# Altium footprint library PcbLib1.PcbLib: 335 footprints (part 11 of 22)
Each footprint in its own frame and in the unit in brackets; x right, y up, seen from the top. Pads: shape width x height; smd on the part's side, far side on the other; paste and mask are expansions set on the pad; w line width, h text height; cw(c..) or ccw(c..) is an arc to the next point about the centre after c.
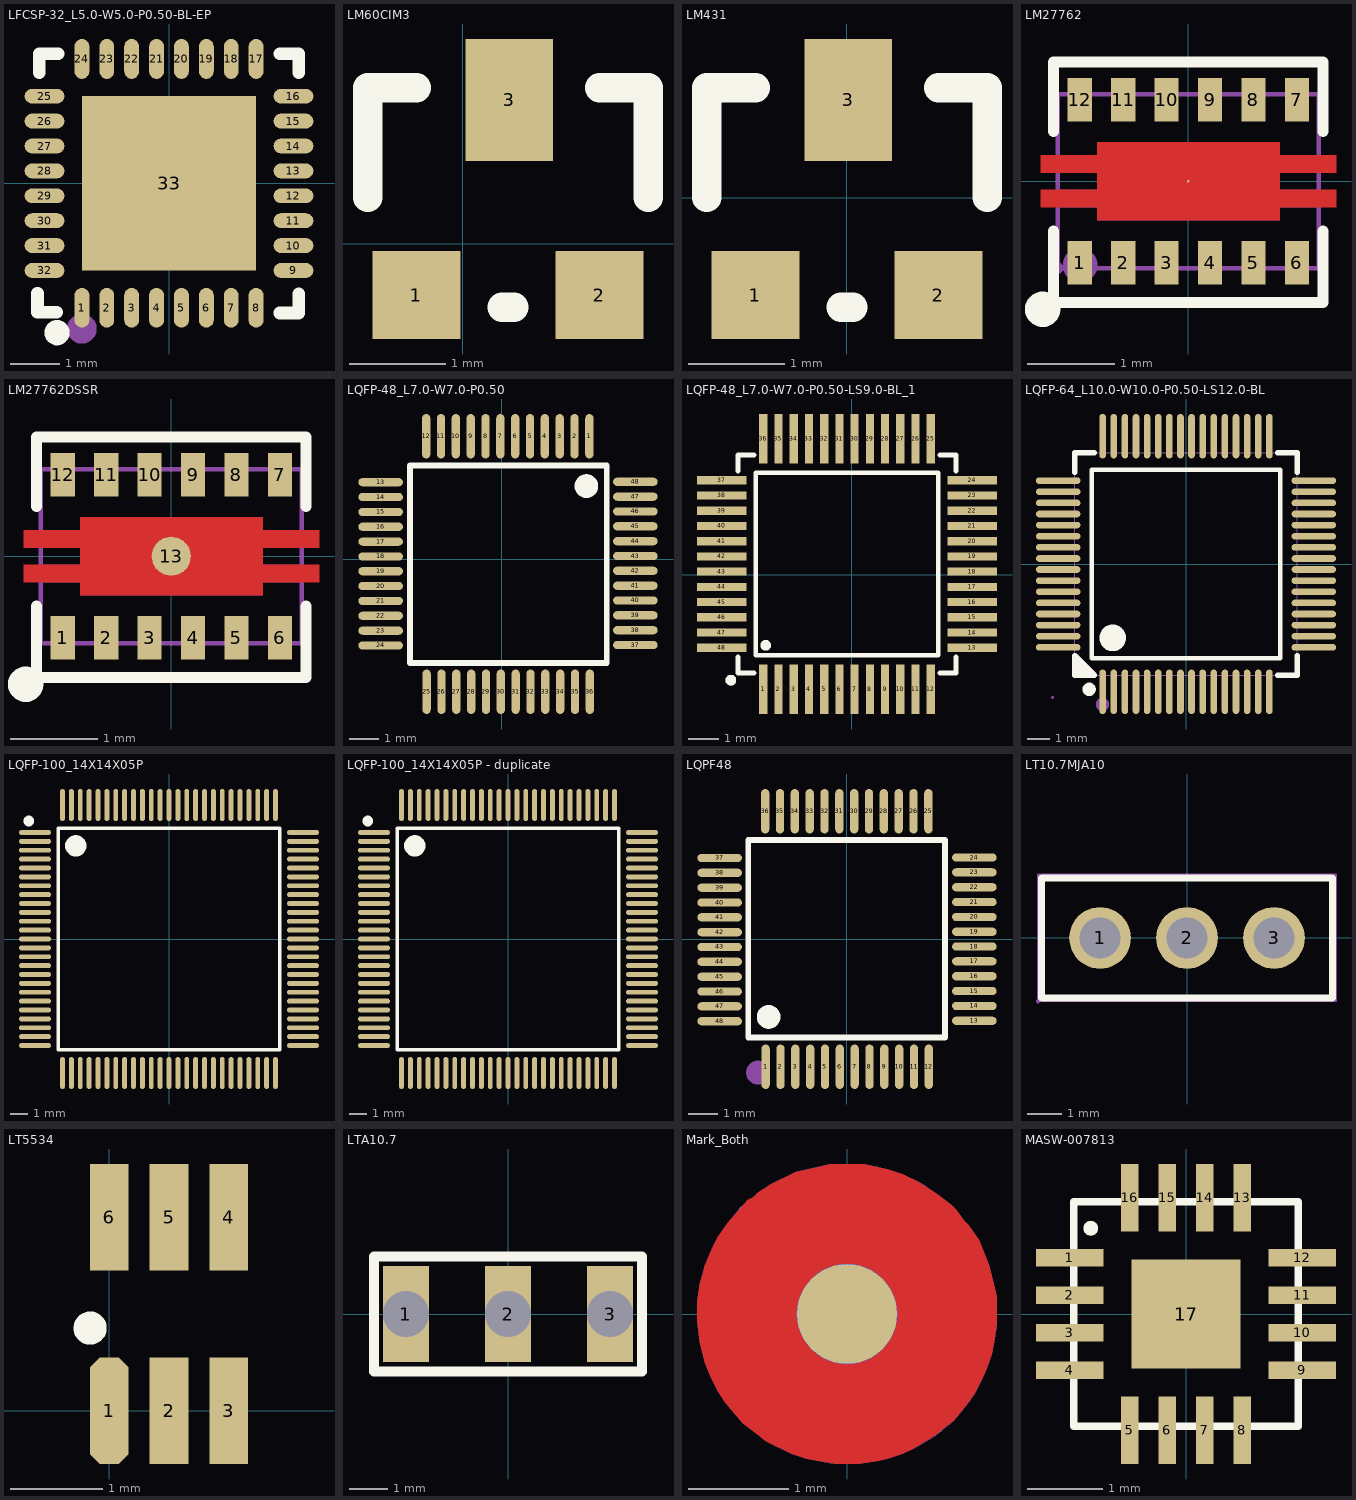
[diagram p10: the footprints below, top view; thin cyan lines are the x and y axes]

## LFCSP-32_L5.0-W5.0-P0.50-BL-EP [mm]
pads (33):
  oval 0.3x0.8 smd: 1(-1.75,-2.5) 2(-1.25,-2.5) 3(-0.75,-2.5) 4(-0.25,-2.5) 5(0.25,-2.5) 6(0.75,-2.5) 7(1.25,-2.5) 8(1.75,-2.5) 17(1.75,2.5) 18(1.25,2.5) 19(0.75,2.5) 20(0.25,2.5) 21(-0.25,2.5) 22(-0.75,2.5) 23(-1.25,2.5) 24(-1.75,2.5)
  oval 0.8x0.3 smd: 9(2.5,-1.75) 10(2.5,-1.25) 11(2.5,-0.75) 12(2.5,-0.25) 13(2.5,0.25) 14(2.5,0.75) 15(2.5,1.25) 16(2.5,1.75) 25(-2.5,1.75) 26(-2.5,1.25) 27(-2.5,0.75) 28(-2.5,0.25) 29(-2.5,-0.25) 30(-2.5,-0.75) 31(-2.5,-1.25) 32(-2.5,-1.75)
  rect 3.5x3.5 smd: 33(0,0)
Top Overlay:
  circle w0.254: c-2.25,-3 r0.127
  lines w0.254: -2.642,-2.21 -2.642,-2.591 -2.261,-2.591 ; -2.604,2.222 -2.604,2.603 -2.223,2.603 ; 2.222,-2.604 2.603,-2.604 2.603,-2.223 ; 2.222,2.603 2.603,2.603 2.603,2.222
Mechanical 15:
  circle w0.3: c-1.752,-2.921 r0.15

## LM60CIM3 [mm]
height 2.54
pads (3):
  rect 0.914x0.914 smd: 1(-0.483,-0.533) 2(1.422,-0.533)
  rect 0.914x1.27 smd: 3(0.482,1.499)
Top Overlay:
  lines w0.305: -0.991,0.483 -0.991,1.626 -0.483,1.626 ; 0.406,-0.66 0.533,-0.66 ; 1.422,1.626 1.93,1.626 1.93,0.483

## LM431 [mil]
height 100
pads (3):
  rect 35.98x35.98 smd: 1(-37.5,-40) 2(37.5,-40)
  rect 35.98x50 smd: 3(0.49,40)
Top Overlay:
  lines w12: -57.48,-0.02 -57.48,44.98 -37.48,44.98 ; -2.48,-45.02 2.52,-45.02 ; 37.52,44.98 57.52,44.98 57.52,-0.02

## LM27762 [mil]
pads (13):
  rect 11x19.7 smd: 1(-49.21,-37) 2(-29.53,-37) 3(-9.84,-37) 4(9.84,-37) 5(29.53,-37) 6(49.21,-37) 7(49.21,37) 8(29.53,37) 9(9.84,37) 10(-9.84,37) 11(-29.53,37) 12(-49.21,37)
  round 1 smd: 13(0,0)
Top Layer:
  region: -41.34,17.72 -41.34,11.81 -66.93,11.81 -66.93,3.94 -41.34,3.94 -41.34,-3.94 -66.93,-3.94 -66.93,-11.81 -41.34,-11.81 -41.34,-17.72 41.34,-17.72 41.34,-11.81 66.93,-11.81 66.93,-3.94 41.34,-3.94 41.34,3.94 66.93,3.94 66.93,11.81 41.34,11.81 41.34,17.72
Top Overlay:
  circle w10: c-66,-58 r3
  lines w5: -61,-22.53 -61,-55 61,-55 61,-22.53 ; -61,22.53 -61,54 61,54 61,22.53
Mechanical 2:
  circle w7.87: c-49,-38 r3.94
Mechanical 6:
  lines w2: -59.06,-39.37 59.05,-39.37 59.05,39.37 -59.06,39.37 -59.06,-39.37
Mechanical 8:
  region: -56.69,-39.37 -56.69,-40.35 -58.07,-41.73 -60.03,-41.73 -61.41,-40.35 -61.41,-39.37 -61.41,-38.39 -60.03,-37.01 -58.07,-37.01 -56.69,-38.39 -56.69,-39.37
Mechanical 9:
  region: -44.29,-27.56 -54.14,-27.56 -54.14,-39.37 -44.29,-39.37
  region: -24.61,-27.56 -34.45,-27.56 -34.45,-39.37 -24.61,-39.37
  region: -4.92,-27.56 -14.77,-27.56 -14.77,-39.37 -4.92,-39.37
  region: 14.77,-27.56 4.92,-27.56 4.92,-39.37 14.77,-39.37
  region: 34.45,-27.56 24.6,-27.56 24.6,-39.37 34.45,-39.37
  region: 54.14,-27.56 44.29,-27.56 44.29,-39.37 54.14,-39.37
  region: -54.14,27.56 -44.29,27.56 -44.29,39.37 -54.14,39.37
  region: -34.45,27.56 -24.61,27.56 -24.61,39.37 -34.45,39.37
  region: -14.77,27.56 -4.92,27.56 -4.92,39.37 -14.77,39.37
  region: 4.92,27.56 14.77,27.56 14.77,39.37 4.92,39.37
  region: 24.6,27.56 34.45,27.56 34.45,39.37 24.6,39.37
  region: 44.29,27.56 54.14,27.56 54.14,39.37 44.29,39.37
  region: -41.34,17.72 -41.34,11.81 -59.45,11.81 -59.45,3.94 -59.06,3.94 -41.34,3.94 -41.34,-3.94 -59.45,-3.94 -59.45,-11.81 -41.34,-11.81 -41.34,-17.72 41.34,-17.72 41.34,-11.81 59.45,-11.81 59.45,-3.94 41.34,-3.94 41.34,3.94 59.45,3.94 59.45,11.81 41.34,11.81 41.34,17.72

## LM27762DSSR [mil]
pads (13):
  rect 11x19.7 smd: 1(-49.21,-37) 2(-29.53,-37) 3(-9.84,-37) 4(9.84,-37) 5(29.53,-37) 6(49.21,-37) 7(49.21,37) 8(29.53,37) 9(9.84,37) 10(-9.84,37) 11(-29.53,37) 12(-49.21,37)
  round 17.72 smd: 13(0,0)
Top Layer:
  region: -41.34,17.72 -41.34,11.81 -66.93,11.81 -66.93,3.94 -41.34,3.94 -41.34,-3.94 -66.93,-3.94 -66.93,-11.81 -41.34,-11.81 -41.34,-17.72 41.34,-17.72 41.34,-11.81 66.93,-11.81 66.93,-3.94 41.34,-3.94 41.34,3.94 66.93,3.94 66.93,11.81 41.34,11.81 41.34,17.72
Top Overlay:
  circle w10: c-66,-58 r3
  lines w5: -61,-22.53 -61,-55 61,-55 61,-22.53 ; -61,22.53 -61,54 61,54 61,22.53
Mechanical 6:
  lines w2: -59.06,-39.37 59.05,-39.37 59.05,39.37 -59.06,39.37 -59.06,-39.37
Mechanical 9:
  region: -44.29,-27.56 -54.14,-27.56 -54.14,-39.37 -44.29,-39.37
  region: -24.61,-27.56 -34.45,-27.56 -34.45,-39.37 -24.61,-39.37
  region: -4.92,-27.56 -14.77,-27.56 -14.77,-39.37 -4.92,-39.37
  region: 14.77,-27.56 4.92,-27.56 4.92,-39.37 14.77,-39.37
  region: 34.45,-27.56 24.6,-27.56 24.6,-39.37 34.45,-39.37
  region: 54.14,-27.56 44.29,-27.56 44.29,-39.37 54.14,-39.37
  region: -54.14,27.56 -44.29,27.56 -44.29,39.37 -54.14,39.37
  region: -34.45,27.56 -24.61,27.56 -24.61,39.37 -34.45,39.37
  region: -14.77,27.56 -4.92,27.56 -4.92,39.37 -14.77,39.37
  region: 4.92,27.56 14.77,27.56 14.77,39.37 4.92,39.37
  region: 24.6,27.56 34.45,27.56 34.45,39.37 24.6,39.37
  region: 44.29,27.56 54.14,27.56 54.14,39.37 44.29,39.37
  region: -41.34,17.72 -41.34,11.81 -59.45,11.81 -59.45,3.94 -59.06,3.94 -41.34,3.94 -41.34,-3.94 -59.45,-3.94 -59.45,-11.81 -41.34,-11.81 -41.34,-17.72 41.34,-17.72 41.34,-11.81 59.45,-11.81 59.45,-3.94 41.34,-3.94 41.34,3.94 59.45,3.94 59.45,11.81 41.34,11.81 41.34,17.72

## LQFP-48_L7.0-W7.0-P0.50 [mm]
pads (48):
  oval 0.28x1.5 smd mask+0: 1(2.949,4.152) 2(2.448,4.152) 3(1.948,4.152) 4(1.448,4.152) 5(0.947,4.152) 6(0.447,4.152) 7(-0.051,4.152) 8(-0.551,4.152) 9(-1.052,4.152) 10(-1.552,4.152) 11(-2.052,4.152) 12(-2.553,4.152) 25(-2.538,-4.459) 26(-2.037,-4.459) 27(-1.537,-4.459) 28(-1.036,-4.459) 29(-0.536,-4.459) 30(-0.036,-4.459) 31(0.462,-4.459) 32(0.963,-4.459) 33(1.463,-4.459) 34(1.963,-4.459) 35(2.464,-4.459) 36(2.964,-4.459)
  oval 1.5x0.28 smd mask+0: 13(-4.087,2.602) 14(-4.087,2.102) 15(-4.087,1.601) 16(-4.087,1.101) 17(-4.087,0.601) 18(-4.087,0.1) 19(-4.087,-0.398) 20(-4.087,-0.898) 21(-4.087,-1.398) 22(-4.087,-1.899) 23(-4.087,-2.399) 24(-4.087,-2.9) 37(4.498,-2.884) 38(4.498,-2.384) 39(4.498,-1.884) 40(4.498,-1.383) 41(4.498,-0.883) 42(4.498,-0.382) 43(4.498,0.115) 44(4.498,0.616) 45(4.498,1.116) 46(4.498,1.617) 47(4.498,2.117) 48(4.498,2.617)
Top Overlay:
  lines w0.2: 2.771,-3.494 3.533,-3.494 3.533,3.161 -3.096,3.161 -3.096,-3.494 3.101,-3.494
  lines w0.4: 2.845,2.272 cw(c2.846,2.472) 2.847,2.272

## LQFP-48_L7.0-W7.0-P0.50-LS9.0-BL_1 [mm]
pads (48):
  rect 0.27x1.62 smd paste+0 mask+0.051: 1(-2.91,-3.762) 2(-2.41,-3.762) 3(-1.91,-3.762) 4(-1.41,-3.762) 5(-0.91,-3.762) 6(-0.41,-3.762) 7(0.09,-3.762) 8(0.59,-3.762) 9(1.09,-3.762) 10(1.59,-3.762) 11(2.09,-3.762) 12(2.59,-3.762) 25(2.59,4.458) 26(2.09,4.458) 27(1.59,4.458) 28(1.09,4.458) 29(0.59,4.458) 30(0.09,4.458) 31(-0.41,4.458) 32(-0.91,4.458) 33(-1.41,4.458) 34(-1.91,4.458) 35(-2.41,4.458) 36(-2.91,4.458)
  rect 1.62x0.27 smd paste+0 mask+0.051: 13(3.95,-2.402) 14(3.95,-1.902) 15(3.95,-1.402) 16(3.95,-0.902) 17(3.95,-0.402) 18(3.95,0.098) 19(3.95,0.598) 20(3.95,1.098) 21(3.95,1.598) 22(3.95,2.098) 23(3.95,2.598) 24(3.95,3.098) 37(-4.27,3.098) 38(-4.27,2.598) 39(-4.27,2.098) 40(-4.27,1.598) 41(-4.27,1.098) 42(-4.27,0.598) 43(-4.27,0.098) 44(-4.27,-0.402) 45(-4.27,-0.902) 46(-4.27,-1.402) 47(-4.27,-1.902) 48(-4.27,-2.402)
Top Overlay:
  circle w0.175: c-3.97,-3.462 r0.087
  circle w0.175: c-2.828,-2.32 r0.087
  lines w0.152: -3.736,-2.694 -3.736,-3.228 -3.202,-3.228 ; -3.736,3.39 -3.736,3.924 -3.202,3.924 ; 2.882,-3.228 3.416,-3.228 3.416,-2.694 ; 2.882,3.924 3.416,3.924 3.416,3.39 ; -3.155,-2.647 2.835,-2.647 2.835,3.343 -3.155,3.343 -3.155,-2.647
Mechanical 15:
  circle w0.175: c-3.97,-3.462 r0.087

## LQFP-64_L10.0-W10.0-P0.50-LS12.0-BL [mm]
pads (64):
  oval 0.3x2 smd paste+0 mask+0.051: 1(-3.75,-5.75) 2(-3.25,-5.75) 3(-2.75,-5.75) 4(-2.25,-5.75) 5(-1.75,-5.75) 6(-1.25,-5.75) 7(-0.75,-5.75) 8(-0.25,-5.75) 9(0.25,-5.75) 10(0.75,-5.75) 11(1.25,-5.75) 12(1.75,-5.75) 13(2.25,-5.75) 14(2.75,-5.75) 15(3.25,-5.75) 16(3.75,-5.75) 33(3.75,5.75) 34(3.25,5.75) 35(2.75,5.75) 36(2.25,5.75) 37(1.75,5.75) 38(1.25,5.75) 39(0.75,5.75) 40(0.25,5.75) 41(-0.25,5.75) 42(-0.75,5.75) 43(-1.25,5.75) 44(-1.75,5.75) 45(-2.25,5.75) 46(-2.75,5.75) 47(-3.25,5.75) 48(-3.75,5.75)
  oval 2x0.3 smd paste+0 mask+0.051: 17(5.75,-3.75) 18(5.75,-3.25) 19(5.75,-2.75) 20(5.75,-2.25) 21(5.75,-1.75) 22(5.75,-1.25) 23(5.75,-0.75) 24(5.75,-0.25) 25(5.75,0.25) 26(5.75,0.75) 27(5.75,1.25) 28(5.75,1.75) 29(5.75,2.25) 30(5.75,2.75) 31(5.75,3.25) 32(5.75,3.75) 49(-5.75,3.75) 50(-5.75,3.25) 51(-5.75,2.75) 52(-5.75,2.25) 53(-5.75,1.75) 54(-5.75,1.25) 55(-5.75,0.75) 56(-5.75,0.25) 57(-5.75,-0.25) 58(-5.75,-0.75) 59(-5.75,-1.25) 60(-5.75,-1.75) 61(-5.75,-2.25) 62(-5.75,-2.75) 63(-5.75,-3.25) 64(-5.75,-3.75)
Top Overlay:
  region: -4.131,-5 -5,-4.131 -5,-5
  lines w0.2: -4.25,-4.25 -4.25,4.25 4.25,4.25 4.25,-4.25 -4.25,-4.25
  lines w0.254: -5,4.131 -5,5 -4.131,5 ; 4.131,-5 5,-5 5,-4.131 ; 4.131,5 5,5 5,4.131 ; -5,-4.131 -5,-4.131 ; -5,-4.131 -4.131,-5 -5,-5 -5,-4.131
  lines w0.3: -4.361,-5.49 ccw(c-4.36,-5.64) -4.359,-5.49
  lines w0.6: -3.299,-3.025 ccw(c-3.297,-3.325) -3.294,-3.025
Mechanical 6:
  circle w0.3: c-3.76,-6.32 r0.15
Mechanical 15:
  drawing of 133 lines, arcs and shapes, not listed

## LQFP-100_14X14X05P [mm]
pads (100):
  oval 1.8x0.28 smd: 1(-7.55,6) 2(-7.55,5.5) 3(-7.55,5) 4(-7.55,4.5) 5(-7.55,4) 6(-7.55,3.5) 7(-7.55,3) 8(-7.55,2.5) 9(-7.55,2) 10(-7.55,1.5) 11(-7.55,1) 12(-7.55,0.5) 13(-7.55,0) 14(-7.55,-0.5) 15(-7.55,-1) 16(-7.55,-1.5) 17(-7.55,-2) 18(-7.55,-2.5) 19(-7.55,-3) 20(-7.55,-3.5) 21(-7.55,-4) 22(-7.55,-4.5) 23(-7.55,-5) 24(-7.55,-5.5) 25(-7.55,-6) 51(7.55,-6) 52(7.55,-5.5) 53(7.55,-5) 54(7.55,-4.5) 55(7.55,-4) 56(7.55,-3.5) 57(7.55,-3) 58(7.55,-2.5) 59(7.55,-2) 60(7.55,-1.5) 61(7.55,-1) 62(7.55,-0.5) 63(7.55,0) 64(7.55,0.5) 65(7.55,1) 66(7.55,1.5) 67(7.55,2) 68(7.55,2.5) 69(7.55,3) 70(7.55,3.5) 71(7.55,4) 72(7.55,4.5) 73(7.55,5) 74(7.55,5.5) 75(7.55,6)
  oval 0.28x1.8 smd: 26(-6,-7.55) 27(-5.5,-7.55) 28(-5,-7.55) 29(-4.5,-7.55) 30(-4,-7.55) 31(-3.5,-7.55) 32(-3,-7.55) 33(-2.5,-7.55) 34(-2,-7.55) 35(-1.5,-7.55) 36(-1,-7.55) 37(-0.5,-7.55) 38(0,-7.55) 39(0.5,-7.55) 40(1,-7.55) 41(1.5,-7.55) 42(2,-7.55) 43(2.5,-7.55) 44(3,-7.55) 45(3.5,-7.55) 46(4,-7.55) 47(4.5,-7.55) 48(5,-7.55) 49(5.5,-7.55) 50(6,-7.55) 76(6,7.55) 77(5.5,7.55) 78(5,7.55) 79(4.5,7.55) 80(4,7.55) 81(3.5,7.55) 82(3,7.55) 83(2.5,7.55) 84(2,7.55) 85(1.5,7.55) 86(1,7.55) 87(0.5,7.55) 88(0,7.55) 89(-0.5,7.55) 90(-1,7.55) 91(-1.5,7.55) 92(-2,7.55) 93(-2.5,7.55) 94(-3,7.55) 95(-3.5,7.55) 96(-4,7.55) 97(-4.5,7.55) 98(-5,7.55) 99(-5.5,7.55) 100(-6,7.55)
Top Overlay:
  lines w0.2: -6.25,-6.25 6.25,-6.25 6.25,6.25 -6.25,6.25 -6.25,-6.25
  lines w0.3: -7.75,6.647 cw(c-7.9,6.647) -7.75,6.65
  lines w0.6: -4.95,5.245 cw(c-5.25,5.249) -4.95,5.25

## LQFP-100_14X14X05P - duplicate [mm]
pads (100):
  oval 1.8x0.28 smd: 1(-7.55,6) 2(-7.55,5.5) 3(-7.55,5) 4(-7.55,4.5) 5(-7.55,4) 6(-7.55,3.5) 7(-7.55,3) 8(-7.55,2.5) 9(-7.55,2) 10(-7.55,1.5) 11(-7.55,1) 12(-7.55,0.5) 13(-7.55,0) 14(-7.55,-0.5) 15(-7.55,-1) 16(-7.55,-1.5) 17(-7.55,-2) 18(-7.55,-2.5) 19(-7.55,-3) 20(-7.55,-3.5) 21(-7.55,-4) 22(-7.55,-4.5) 23(-7.55,-5) 24(-7.55,-5.5) 25(-7.55,-6) 51(7.55,-6) 52(7.55,-5.5) 53(7.55,-5) 54(7.55,-4.5) 55(7.55,-4) 56(7.55,-3.5) 57(7.55,-3) 58(7.55,-2.5) 59(7.55,-2) 60(7.55,-1.5) 61(7.55,-1) 62(7.55,-0.5) 63(7.55,0) 64(7.55,0.5) 65(7.55,1) 66(7.55,1.5) 67(7.55,2) 68(7.55,2.5) 69(7.55,3) 70(7.55,3.5) 71(7.55,4) 72(7.55,4.5) 73(7.55,5) 74(7.55,5.5) 75(7.55,6)
  oval 0.28x1.8 smd: 26(-6,-7.55) 27(-5.5,-7.55) 28(-5,-7.55) 29(-4.5,-7.55) 30(-4,-7.55) 31(-3.5,-7.55) 32(-3,-7.55) 33(-2.5,-7.55) 34(-2,-7.55) 35(-1.5,-7.55) 36(-1,-7.55) 37(-0.5,-7.55) 38(0,-7.55) 39(0.5,-7.55) 40(1,-7.55) 41(1.5,-7.55) 42(2,-7.55) 43(2.5,-7.55) 44(3,-7.55) 45(3.5,-7.55) 46(4,-7.55) 47(4.5,-7.55) 48(5,-7.55) 49(5.5,-7.55) 50(6,-7.55) 76(6,7.55) 77(5.5,7.55) 78(5,7.55) 79(4.5,7.55) 80(4,7.55) 81(3.5,7.55) 82(3,7.55) 83(2.5,7.55) 84(2,7.55) 85(1.5,7.55) 86(1,7.55) 87(0.5,7.55) 88(0,7.55) 89(-0.5,7.55) 90(-1,7.55) 91(-1.5,7.55) 92(-2,7.55) 93(-2.5,7.55) 94(-3,7.55) 95(-3.5,7.55) 96(-4,7.55) 97(-4.5,7.55) 98(-5,7.55) 99(-5.5,7.55) 100(-6,7.55)
Top Overlay:
  lines w0.2: -6.25,-6.25 6.25,-6.25 6.25,6.25 -6.25,6.25 -6.25,-6.25
  lines w0.3: -7.75,6.647 cw(c-7.9,6.647) -7.75,6.65
  lines w0.6: -4.95,5.245 cw(c-5.25,5.249) -4.95,5.25

## LQPF48 [mm]
pads (48):
  oval 0.28x1.5 smd: 1(-2.743,-4.305) 2(-2.243,-4.305) 3(-1.742,-4.305) 4(-1.242,-4.305) 5(-0.742,-4.305) 6(-0.241,-4.305) 7(0.257,-4.305) 8(0.757,-4.305) 9(1.257,-4.305) 10(1.758,-4.305) 11(2.258,-4.305) 12(2.758,-4.305) 25(2.743,4.305) 26(2.243,4.305) 27(1.742,4.305) 28(1.242,4.305) 29(0.742,4.305) 30(0.241,4.305) 31(-0.257,4.305) 32(-0.757,4.305) 33(-1.257,4.305) 34(-1.758,4.305) 35(-2.258,4.305) 36(-2.758,4.305)
  oval 1.5x0.28 smd: 13(4.293,-2.756) 14(4.293,-2.256) 15(4.293,-1.755) 16(4.293,-1.255) 17(4.293,-0.754) 18(4.293,-0.254) 19(4.293,0.244) 20(4.293,0.744) 21(4.293,1.245) 22(4.293,1.745) 23(4.293,2.245) 24(4.293,2.746) 37(-4.293,2.731) 38(-4.293,2.23) 39(-4.293,1.73) 40(-4.293,1.229) 41(-4.293,0.729) 42(-4.293,0.229) 43(-4.293,-0.269) 44(-4.293,-0.77) 45(-4.293,-1.27) 46(-4.293,-1.77) 47(-4.293,-2.271) 48(-4.293,-2.771)
Top Overlay:
  lines w0.2: -2.896,3.34 3.302,3.34 3.302,-3.315 -3.327,-3.315 -3.327,3.34 -2.565,3.34
  lines w0.4: -2.642,-2.426 ccw(c-2.64,-2.626) -2.639,-2.426
Mechanical 15:
  circle w0.4: c-3,-4.5 r0.2

## LT10.7MJA10 [mm]
pads (3):
  round 1.8 hole 1.2: 1(-2.54,0) 2(0,0) 3(2.54,0)
Top Overlay:
  lines w0.2: -4.25,-1.75 -4.25,1.75 4.25,1.75 4.25,-1.75 -4.25,-1.75
Mechanical 15:
  region: -4.29,-1.85 -4.29,-1.825 -4.325,-1.79 -4.375,-1.79 -4.41,-1.825 -4.41,-1.85 -4.41,-1.875 -4.375,-1.91 -4.325,-1.91 -4.29,-1.875 -4.29,-1.85
  region: -2.04,0 -2.04,0.099 -2.116,0.283 -2.257,0.424 -2.441,0.5 -2.639,0.5 -2.823,0.424 -2.964,0.283 -3.04,0.099 -3.04,0 -3.04,-0.099 -2.964,-0.283 -2.823,-0.424 -2.639,-0.5 -2.441,-0.5 -2.257,-0.424 -2.116,-0.283 -2.04,-0.099 -2.04,0
  region: 3.04,0 3.04,0.099 2.964,0.283 2.823,0.424 2.639,0.5 2.441,0.5 2.257,0.424 2.116,0.283 2.04,0.099 2.04,0 2.04,-0.099 2.116,-0.283 2.257,-0.424 2.441,-0.5 2.639,-0.5 2.823,-0.424 2.964,-0.283 3.04,-0.099 3.04,0
  region: 0.5,0 0.5,0.099 0.424,0.283 0.283,0.424 0.099,0.5 -0.099,0.5 -0.283,0.424 -0.424,0.283 -0.5,0.099 -0.5,0 -0.5,-0.099 -0.424,-0.283 -0.283,-0.424 -0.099,-0.5 0.099,-0.5 0.283,-0.424 0.424,-0.283 0.5,-0.099 0.5,0
  lines w0.051: -4.35,-1.85 -4.35,1.85 4.35,1.85 4.35,-1.85 -4.35,-1.85

## LT5534 [mm]
pads (6):
  oct 0.42x1.16 smd: 1(0,0)
  rect 0.42x1.16 smd: 2(0.65,0) 3(1.3,0) 4(1.3,2.1) 5(0.65,2.1) 6(0,2.1)
Top Overlay:
  circle w0.2: c-0.207,0.897 r0.08

## LTA10.7 [mm]
pads (3):
  rect 1.2x2.5 hole 1.2 square: 1(-2.667,0) 2(0,0) 3(2.667,0)
Top Overlay:
  lines w0.254: -3.5,-1.5 3.5,-1.5 3.5,1.5 -3.5,1.5 -3.5,-1.5
Mechanical 15:
  region: 2.161,0.504 3.173,0.504 3.173,-0.508 2.161,-0.508
  region: -0.506,0.504 0.506,0.504 0.506,-0.508 -0.506,-0.508
  region: -3.173,0.504 -2.161,0.504 -2.161,-0.508 -3.173,-0.508
  lines w0.051: -3.5,-1.5 -3.5,1.5 3.5,1.5 3.5,-1.5 -3.5,-1.5

## Mark_Both [mm] "MARK POINT for PCB"
height 0.9
pads (4):
  round 1 smd: ""(0,0)
  round 1 smd far side: ""(0,0)
  round 3 on Top Solder: ""(0,0)
  round 3 on Bottom Solder: ""(0,0)
Top Layer:
  pour cut-out: 0.127,-1.499 0.305,-1.473 0.406,-1.448 0.559,-1.397 0.66,-1.346 0.838,-1.245 0.914,-1.194 0.94,-1.168 1.067,-1.067 1.194,-0.914 1.27,-0.813 1.372,-0.61 1.448,-0.406 1.473,-0.279 1.499,-0.102 1.499,0.178 1.422,0.483 1.321,0.737 1.219,0.889 1.168,0.94 1.092,1.041 1.041,1.092 0.914,1.194 0.838,1.245 0.711,1.321 0.559,1.397 0.406,1.448 0.178,1.499 -0.178,1.499 -0.279,1.473 -0.508,1.422 -0.762,1.295 -0.889,1.219 -0.94,1.168 -0.991,1.143 -1.194,0.914 -1.295,0.762 -1.346,0.66 -1.422,0.483 -1.448,0.381 -1.473,0.305 -1.499,0.127 -1.499,-0.076 -1.473,-0.279 -1.422,-0.483 -1.372,-0.61 -1.295,-0.762 -1.219,-0.889 -1.041,-1.092 -0.914,-1.194 -0.813,-1.27 -0.559,-1.397 -0.406,-1.448 -0.279,-1.473 -0.127,-1.499
Bottom Layer:
  pour cut-out: 0.127,-1.499 0.279,-1.473 0.406,-1.448 0.559,-1.397 0.711,-1.321 0.889,-1.219 1.067,-1.067 1.219,-0.889 1.295,-0.762 1.346,-0.66 1.422,-0.483 1.473,-0.279 1.499,-0.127 1.499,0.076 1.473,0.279 1.422,0.483 1.372,0.61 1.295,0.762 1.245,0.838 1.168,0.94 1.067,1.067 0.94,1.168 0.762,1.295 0.559,1.397 0.305,1.473 0.178,1.499 -0.178,1.499 -0.508,1.422 -0.762,1.295 -0.94,1.168 -1.067,1.067 -1.245,0.838 -1.321,0.711 -1.422,0.483 -1.473,0.305 -1.499,0.102 -1.499,-0.076 -1.473,-0.279 -1.422,-0.483 -1.295,-0.762 -1.168,-0.94 -1.041,-1.092 -0.838,-1.245 -0.711,-1.321 -0.559,-1.397 -0.406,-1.448 -0.152,-1.499

## MASW-007813 [mm] "cp2102"
pads (18):
  rect 0.9x0.23 smd: 1(-1.55,0.75) 2(-1.55,0.25) 3(-1.55,-0.25) 4(-1.55,-0.75) 9(1.55,-0.75) 10(1.55,-0.25) 11(1.55,0.25) 12(1.55,0.75)
  rect 0.23x0.9 smd: 5(-0.75,-1.55) 6(-0.25,-1.55) 7(0.25,-1.55) 8(0.75,-1.55) 13(0.75,1.55) 14(0.25,1.55) 15(-0.25,1.55) 16(-0.75,1.55)
  rect 1.45x1.45 smd: 17(0,0)
  round 0.2 on Top Overlay: ""(-1.27,1.143)
Top Overlay:
  lines w0.1: -1.5,-1.5 -1.5,1.5 1.5,1.5 1.5,-1.5 -1.5,-1.5